# Altium footprint library Propia.PcbLib: 378 footprints (part 10 of 24)
Each footprint in its own frame and in the unit in brackets; x right, y up, seen from the top. Pads: shape width x height; smd on the part's side, far side on the other; paste and mask are expansions set on the pad; w line width, h text height; cw(c..) or ccw(c..) is an arc to the next point about the centre after c.
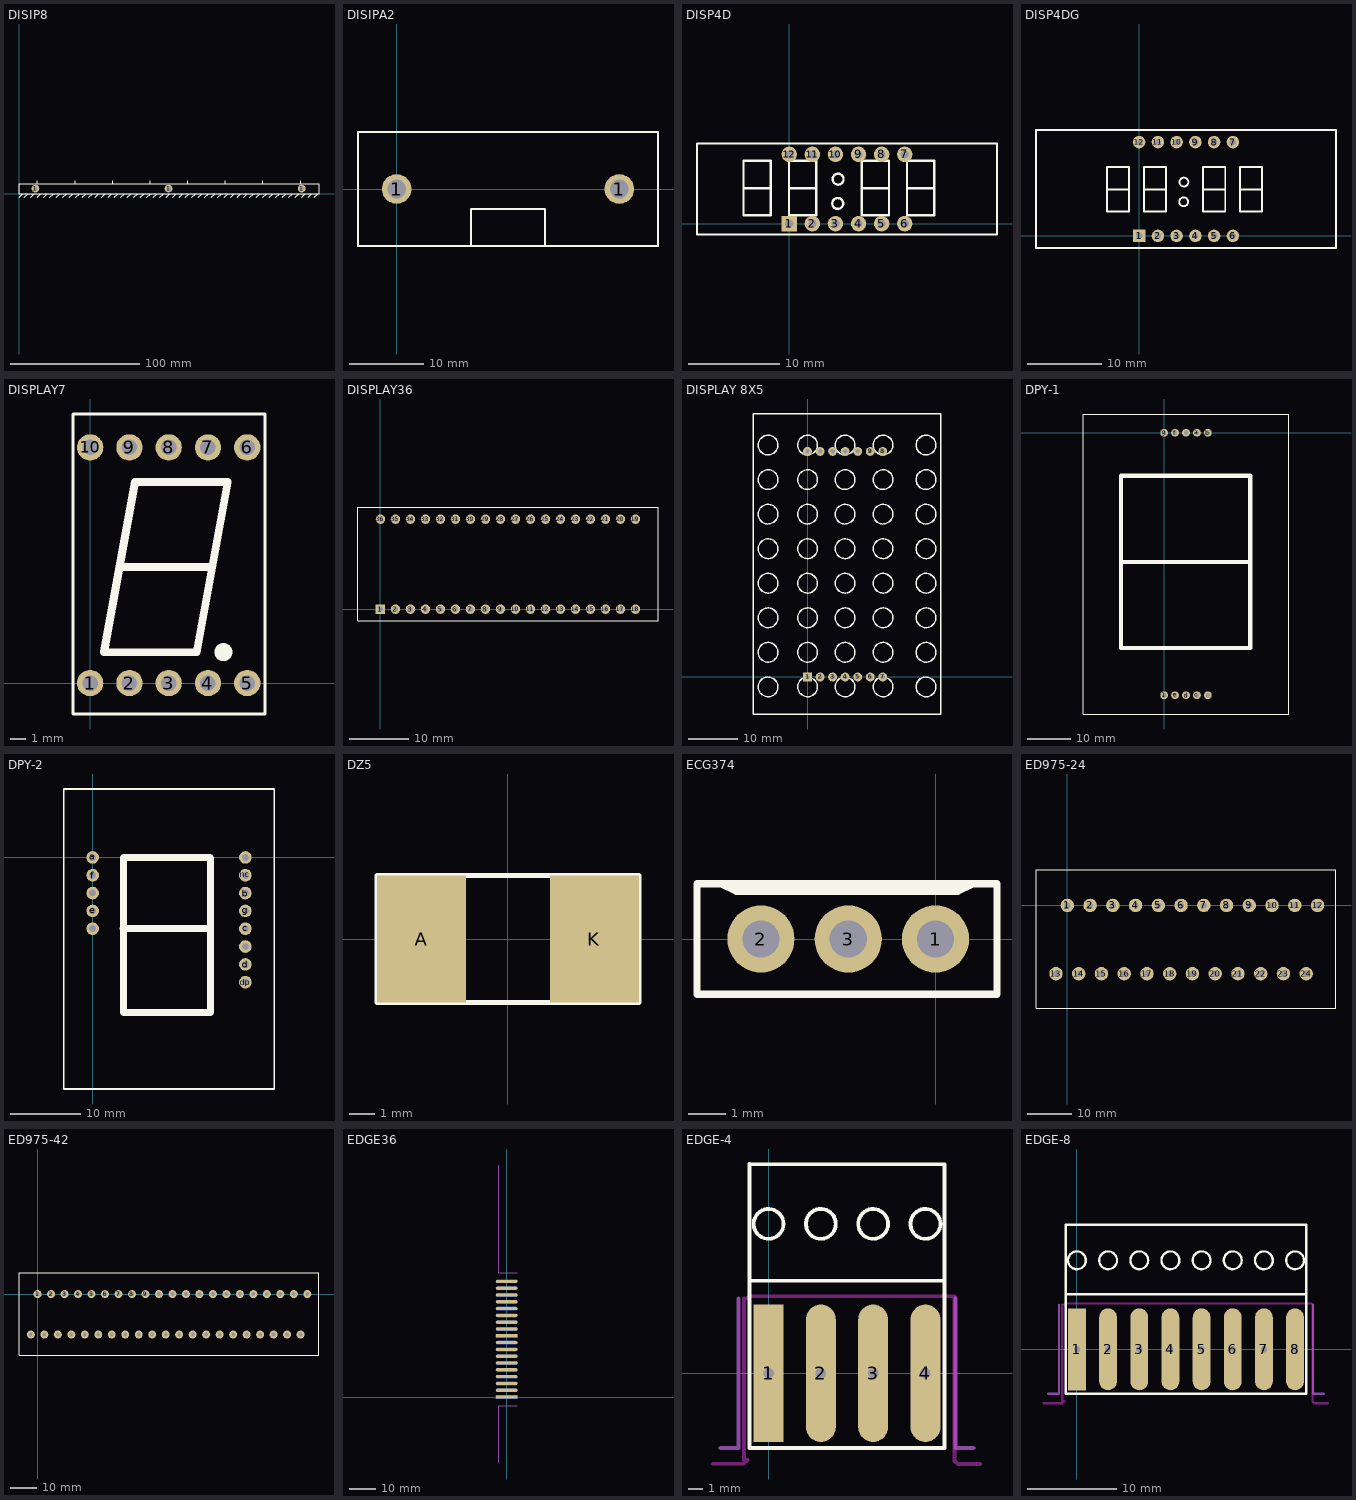
[diagram p9: the footprints below, top view; thin cyan lines are the x and y axes]

## DISIP8 [mm]
pads (3):
  round 6 hole 3.5: 1(12.7,3.81) 1(115.88,3.81) 1(219.075,3.81)
TopOverlay:
  lines w0.254: 0,-3 3,0 ; 4,-3 7,0 ; 9,-3 12,0 ; 14,-3 17,0 ; 14.287,7.62 14.287,10 ; 19,-3 22,0 ; 24,-3 27,0 ; 29,-3 32,0 ; 34,-3 37,0 ; 39,-3 42,0 ; 43.419,7.62 43.419,10 ; 44,-3 47,0 ; 49,-3 52,0 ; 54,-3 57,0 ; 59,-3 62,0 ; 64,-3 67,0 ; 69,-3 72,0 ; 72.552,7.62 72.552,10 ; 74,-3 77,0 ; 79,-3 82,0 ; 84,-3 87,0 ; 89,-3 92,0 ; 94,-3 97,0 ; 99,-3 102,0 ; 101.683,7.62 101.683,10 ; 104,-3 107,0 ; 109,-3 112,0 ; 114,-3 117,0 ; 119,-3 122,0 ; 124,-3 127,0 ; 129,-3 132,0 ; 130.815,7.62 130.815,10 ; 134,-3 137,0 ; 139,-3 142,0 ; 144,-3 147,0 ; 149,-3 152,0 ; 154,-3 157,0 ; 159,-3 162,0 ; 159.947,7.62 159.947,10 ; 164,-3 167,0 ; 169,-3 172,0 ; 174,-3 177,0 ; 179,-3 182,0 ; 184,-3 187,0 ; 189,-3 192,0 ; 189.079,7.62 189.079,10 ; 194,-3 197,0 ; 199,-3 202,0 ; 204,-3 207,0 ; 209,-3 212,0 ; 214,-3 217,0 ; 218.212,7.62 218.212,10 ; 219,-3 222,0 ; 224,-3 227,0 ; 229,-3 232,0 ; 0,0 232.5,0 232.5,7.62 0,7.62 0,0

## DISIPA2 [mm]
pads (2):
  round 4 hole 2.5: 1(0,0) 1(30,0)
TopOverlay:
  lines w0.254: 10,-7.7 10,-2.7 20,-2.7 20,-7.7 ; -5.2,-7.7 -5.2,7.7 35.2,7.7 35.2,-7.7 -5.2,-7.7

## DISP4D [mm]
pads (12):
  rect 1.7x1.7 hole 0.9: 1(0,0)
  round 1.7 hole 0.9: 2(2.54,0) 3(5.08,0) 4(7.62,0) 5(10.16,0) 6(12.7,0) 7(12.7,7.62) 8(10.16,7.62) 9(7.62,7.62) 10(5.08,7.62) 11(2.54,7.62) 12(0,7.62)
TopOverlay:
  circle w0.254: c5.37,4.89 r0.6
  circle w0.254: c5.33,2.22 r0.6
  lines w0.254: -5.02,3.9 -2.23,3.9 ; -0.02,3.9 2.77,3.9 ; 7.98,3.9 10.77,3.9 ; 12.98,3.9 15.77,3.9 ; -10.15,-1.19 -10.15,8.81 22.85,8.81 22.85,-1.19 -10.15,-1.19 ; -5.04,0.91 -2.04,0.91 -2.04,6.91 -2.05,6.92 -5.04,6.92 -5.04,0.91 ; -0.04,0.91 2.96,0.91 2.96,6.91 2.95,6.92 -0.04,6.92 -0.04,0.91 ; 7.96,0.91 10.96,0.91 10.96,6.91 10.95,6.92 7.96,6.92 7.96,0.91 ; 12.96,0.91 15.96,0.91 15.96,6.91 15.95,6.92 12.96,6.92 12.96,0.91

## DISP4DG [mm]
pads (12):
  rect 1.7x1.7 hole 0.9: 1(0,0)
  round 1.7 hole 0.9: 2(2.54,0) 3(5.08,0) 4(7.62,0) 5(10.16,0) 6(12.7,0) 7(12.7,12.7) 8(10.16,12.7) 9(7.62,12.7) 10(5.08,12.7) 11(2.54,12.7) 12(0,12.7)
TopOverlay:
  circle w0.254: c6.07,7.29 r0.6
  circle w0.254: c6.03,4.62 r0.6
  lines w0.254: -4.32,6.3 -1.53,6.3 ; 0.68,6.3 3.47,6.3 ; 3.65,9.32 0.66,9.32 0.66,3.31 3.66,3.31 3.66,9.31 ; 8.68,6.3 11.47,6.3 ; 11.65,9.32 8.66,9.32 8.66,3.31 11.66,3.31 11.66,9.31 ; 13.68,6.3 16.47,6.3 ; 16.65,9.32 13.66,9.32 13.66,3.31 16.66,3.31 16.66,9.31 ; -13.95,-1.65 26.65,-1.65 26.65,14.35 -13.95,14.35 -13.95,-1.65 ; -4.34,3.31 -1.34,3.31 -1.34,9.31 -1.35,9.32 -4.34,9.32 -4.34,3.31

## DISPLAY7 [mm]
pads (10):
  round 1.7 hole 1: 1(0,0) 2(2.54,0) 3(5.08,0) 4(7.62,0) 5(10.16,0) 6(10.16,15.24) 7(7.62,15.24) 8(5.08,15.24) 9(2.54,15.24) 10(0,15.24)
TopOverlay:
  circle w0.6: c8.617,2 r0.283
  lines w0.2: -1.1,-2 -1.1,17.4 11.3,17.4 11.3,-2 -1.1,-2
  lines w0.5: 1.9,7.5 0.9,2 6.9,2 7.9,7.5 ; 1.9,7.5 2.9,13 8.9,13 7.9,7.5 ; 1.9,7.5 7.9,7.5

## DISPLAY36 [mm]
pads (36):
  rect 1.6x1.6 hole 0.9: 1(0,0)
  round 1.6 hole 0.9: 2(2.54,0) 3(5.08,0) 4(7.62,0) 5(10.16,0) 6(12.7,0) 7(15.24,0) 8(17.78,0) 9(20.32,0) 10(22.86,0) 11(25.4,0) 12(27.94,0) 13(30.48,0) 14(33.02,0) 15(35.56,0) 16(38.1,0) 17(40.64,0) 18(43.18,0) 19(43.18,15.24) 20(40.64,15.24) 21(38.1,15.24) 22(35.56,15.24) 23(33.02,15.24) 24(30.48,15.24) 25(27.94,15.24) 26(25.4,15.24) 27(22.86,15.24) 28(20.32,15.24) 29(17.78,15.24) 30(15.24,15.24) 31(12.7,15.24) 32(10.16,15.24) 33(7.62,15.24) 34(5.08,15.24) 35(2.54,15.24) 36(0,15.24)
TopOverlay:
  lines w0.2: -3.8,-2 47,-2 47,17.3 -3.8,17.3 -3.8,-2

## DISPLAY 8X5 [mm]
pads (14):
  rect 1.8x1.8 hole 0.9: 1(0,0)
  round 1.8 hole 0.9: 2(2.54,0) 3(5.08,0) 4(7.62,0) 5(10.16,0) 6(12.7,0) 7(15.24,0) 8(15.24,45.72) 9(12.7,45.72) 10(10.16,45.72) 11(7.62,45.72) 12(5.08,45.72) 13(2.54,45.72) 14(0,45.72)
TopOverlay:
  circle w0.254: c15.3,47 r2
  circle w0.254: c0,47 r2
  circle w0.254: c7.6,47 r2
  circle w0.254: c24,47 r2
  circle w0.254: c-8,47 r2
  circle w0.254: c15.3,40 r2
  circle w0.254: c0,40 r2
  circle w0.254: c7.6,40 r2
  circle w0.254: c24,40 r2
  circle w0.254: c-8,40 r2
  circle w0.254: c15.3,33 r2
  circle w0.254: c0,33 r2
  circle w0.254: c7.6,33 r2
  circle w0.254: c24,33 r2
  circle w0.254: c-8,33 r2
  circle w0.254: c15.3,26 r2
  circle w0.254: c0,26 r2
  circle w0.254: c7.6,26 r2
  circle w0.254: c24,26 r2
  circle w0.254: c-8,26 r2
  circle w0.254: c15.3,19 r2
  circle w0.254: c0,19 r2
  circle w0.254: c7.6,19 r2
  circle w0.254: c24,19 r2
  circle w0.254: c-8,19 r2
  circle w0.254: c15.3,12 r2
  circle w0.254: c0,12 r2
  circle w0.254: c7.6,12 r2
  circle w0.254: c24,12 r2
  circle w0.254: c-8,12 r2
  circle w0.254: c15.3,5 r2
  circle w0.254: c0,5 r2
  circle w0.254: c7.6,5 r2
  circle w0.254: c24,5 r2
  circle w0.254: c-8,5 r2
  circle w0.254: c15.3,-2 r2
  circle w0.254: c0,-2 r2
  circle w0.254: c7.6,-2 r2
  circle w0.254: c24,-2 r2
  circle w0.254: c-8,-2 r2
  lines w0.254: -11,-7.5 -11,53.3 27,53.3 27,-7.5 -11,-7.5

## DPY-1 [mm]
pads (10):
  round 1.8 hole 1: 1(0,-60.96) a(7.62,0) b(10.16,0) c(7.62,-60.96) com(10.16,-60.96) d(5.08,-60.96) dp(5.08,0) e(2.54,-60.96) f(2.54,0) g(0,0)
TopOverlay:
  lines w0.254: -18.77,-65.33 -18.77,4.37 28.93,4.37 28.93,-65.33 -18.77,-65.33
  lines w1: -9.98,-30 20,-30 ; -10,-50 20,-50 20,-10 -10,-10 -10,-50

## DPY-2 [mm]
pads (13):
  round 1.8 hole 1: a(0,0) b(21.75,-5.08) c(21.75,-10.16) com(0,-10.16) com(0,-5.08) com(21.75,-12.7) com(21.75,0) d(21.75,-15.24) dp(21.75,-17.78) e(0,-7.62) f(0,-2.54) g(21.75,-7.62) nc(21.75,-2.54)
TopOverlay:
  lines w0.254: -4.125,-33 -4.125,9.75 25.875,9.75 25.875,-33 -4.125,-33
  lines w1: 4.32,-10.11 16.56,-10.11 16.64,-10.19 ; 4.4,-22.13 4.4,0.02 16.71,0.02 16.79,-0.06 16.79,-22.13 4.4,-22.13

## DZ5 [mm]
pads (2):
  rect 3.5x5 smd: A(-3.4,0) K(3.4,0)
TopOverlay:
  lines w0.2: -5.15,-2.5 -5.15,0 -5.15,2.5 5.15,2.5 5.15,-2.5 -5.15,-2.5

## ECG374 [mm]
pads (3):
  round 1.8 hole 1: 1(0,0) 2(-4.68,0) 3(-2.34,0)
TopOverlay:
  lines w0.2: -5.759,1.482 -5.336,1.282 0.59,1.282 1.014,1.482 ; -6.394,-1.482 -6.394,1.482 1.649,1.482 1.649,-1.482 -6.394,-1.482

## ED975-24 [mm]
pads (24):
  round 3 hole 1.4: 1(0,0) 2(5.08,0) 3(10.16,0) 4(15.24,0) 5(20.32,0) 6(25.4,0) 7(30.48,0) 8(35.56,0) 9(40.64,0) 10(45.72,0) 11(50.8,0) 12(55.88,0) 13(-2.54,-15.24) 14(2.54,-15.24) 15(7.62,-15.24) 16(12.7,-15.24) 17(17.78,-15.24) 18(22.86,-15.24) 19(27.94,-15.24) 20(33.02,-15.24) 21(38.1,-15.24) 22(43.18,-15.24) 23(48.26,-15.24) 24(53.34,-15.24)
TopOverlay:
  lines w0.254: -7,-23 60,-23 60,8 -7,8 -7,-23

## ED975-42 [mm]
pads (42):
  round 3 hole 1.4: 1(0,0) 2(5.08,0) 3(10.16,0) 4(15.24,0) 5(20.32,0) 6(25.4,0) 7(30.48,0) 8(35.56,0) 9(40.64,0) 10(45.72,0) 11(50.8,0) 12(55.88,0) 13(60.96,0) 14(66.04,0) 15(71.12,0) 16(76.2,0) 17(81.28,0) 18(86.36,0) 19(91.44,0) 20(96.52,0) 21(101.6,0) 22(-2.54,-15.24) 23(2.54,-15.24) 24(7.62,-15.24) 25(12.7,-15.24) 26(17.78,-15.24) 27(22.86,-15.24) 28(27.94,-15.24) 29(33.02,-15.24) 30(38.1,-15.24) 31(43.18,-15.24) 32(48.26,-15.24) 33(53.34,-15.24) 34(58.42,-15.24) 35(63.5,-15.24) 36(68.58,-15.24) 37(73.66,-15.24) 38(78.74,-15.24) 39(83.82,-15.24) 40(88.9,-15.24) 41(93.98,-15.24) 42(99.06,-15.24)
TopOverlay:
  lines w0.254: -7,-23 106,-23 106,8 -7,8 -7,-23

## EDGE36 [mm]
pads (36):
  rect 8x1.2 smd: A1(0,0) A10(0,22.86)
  oval 8x1.2 smd: A2(0,2.54) A3(0,5.08) A4(0,7.62) A5(0,10.16) A6(0,12.7) A7(0,15.24) A8(0,17.78) A9(0,20.32) A11(0,25.4) A12(0,27.94) A13(0,30.48) A14(0,33.02) A15(0,35.56) A16(0,38.1) A17(0,40.64) A18(0,43.18)
  rect 8x1.2 smd far side: B1(0,0) B10(0,22.86)
  oval 8x1.2 smd far side: B2(0,2.54) B3(0,5.08) B4(0,7.62) B5(0,10.16) B6(0,12.7) B7(0,15.24) B8(0,17.78) B9(0,20.32) B11(0,25.4) B12(0,27.94) B13(0,30.48) B14(0,33.02) B15(0,35.56) B16(0,38.1) B17(0,40.64) B18(0,43.18)
TopSolder:
  region: 5,-25 5,87 -4,87 -4,-25
BottomSolder:
  region: 5,-25 5,87 -4,87 -4,-25
Mechanical1:
  lines w0.254: -3,-24.5 -3,-3.29 4,-3.29 ; -3,86.5 -3,46.47 4,46.47

## EDGE-4 [mm]
pads (4):
  rect 2x9.2 hole 0.7: 1(0,0)
  oval 2x9.2 hole 0.7: 2(3.5,0) 3(7,0) 4(10.5,0)
TopOverlay:
  circle w0.254: c0,10 r1
  circle w0.254: c3.5,10 r1
  circle w0.254: c7,10 r1
  circle w0.254: c10.5,10 r1
  circle w0.254: c7,10 r1
  circle w0.254: c10.5,10 r1
  lines w0.254: -1.27,6.2 11.77,6.2 11.77,-5 -1.27,-5 -1.27,0.01 -1.27,6.21 -1.27,14.01 ; -1.27,14 11.77,14 11.77,6.15
TopSolder:
  rectangle: -4,-5 14.35,5
  rectangle: -4,-6 -1,-4.72
  rectangle: 12,-6 14.35,-5
BottomSolder:
  rectangle: -4,-5 14.35,5
  rectangle: -4,-6 -1,-4.48
  rectangle: 12,-6 14.35,-4.53
KeepOutLayer:
  lines w0.254: -3.73,-6.05 -1.66,-6.05 -1.41,-5.8 ; -1.64,-5.8 -1.64,5.03 ; -1.41,5.03 -1.28,5.16 -1.18,5.16 ; -1.27,5.16 12.44,5.16 ; 12.33,5.16 12.45,5.04 12.45,-5.86 12.66,-6.07 14.16,-6.07
Mechanical1:
  lines w0.254: -3.22,-5 -2.02,-5 -2.02,5 ; 12.52,5 12.52,-5 13.72,-5

## EDGE-8 [mm]
pads (8):
  rect 2x9.2 hole 0.7: 1(0,0)
  oval 2x9.2 hole 0.7: 2(3.5,0) 3(7,0) 4(10.5,0) 5(14,0) 6(17.5,0) 7(21,0) 8(24.5,0)
TopOverlay:
  circle w0.254: c0,10 r1
  circle w0.254: c3.5,10 r1
  circle w0.254: c7,10 r1
  circle w0.254: c10.5,10 r1
  circle w0.254: c14,10 r1
  circle w0.254: c17.5,10 r1
  circle w0.254: c21,10 r1
  circle w0.254: c24.5,10 r1
  lines w0.254: -1.27,6.2 25.77,6.2 25.77,-5 -1.27,-5 -1.27,0.01 -1.27,6.21 -1.27,14.01 ; -1.27,14 25.77,14 25.77,6.15
TopSolder:
  rectangle: -4,-5 28.35,5
  rectangle: -4,-6 -1,-4.72
  rectangle: 26,-6 28.35,-5
BottomSolder:
  rectangle: -4,-5 28.35,5
  rectangle: -4,-6 -1,-4.48
  rectangle: 26,-6 28.35,-4.53
KeepOutLayer:
  lines w0.254: -3.73,-6.05 -1.66,-6.05 -1.41,-5.8 ; -1.64,-5.8 -1.64,5.03 ; -1.41,5.03 -1.28,5.16 -1.18,5.16 ; -1.27,5.16 26.33,5.16 26.45,5.04 26.45,-5.86 26.66,-6.07 28.16,-6.07
Mechanical1:
  lines w0.254: -3.22,-5 -2.02,-5 -2.02,5 ; 26.52,5 26.52,-5 27.72,-5